# Altium footprint library Miscellaneous Devices.PcbLib: 306 footprints (part 2 of 20)
Each footprint in its own frame and in the unit in brackets; x right, y up, seen from the top. Pads: shape width x height; smd on the part's side, far side on the other; paste and mask are expansions set on the pad; w line width, h text height; cw(c..) or ccw(c..) is an arc to the next point about the centre after c.
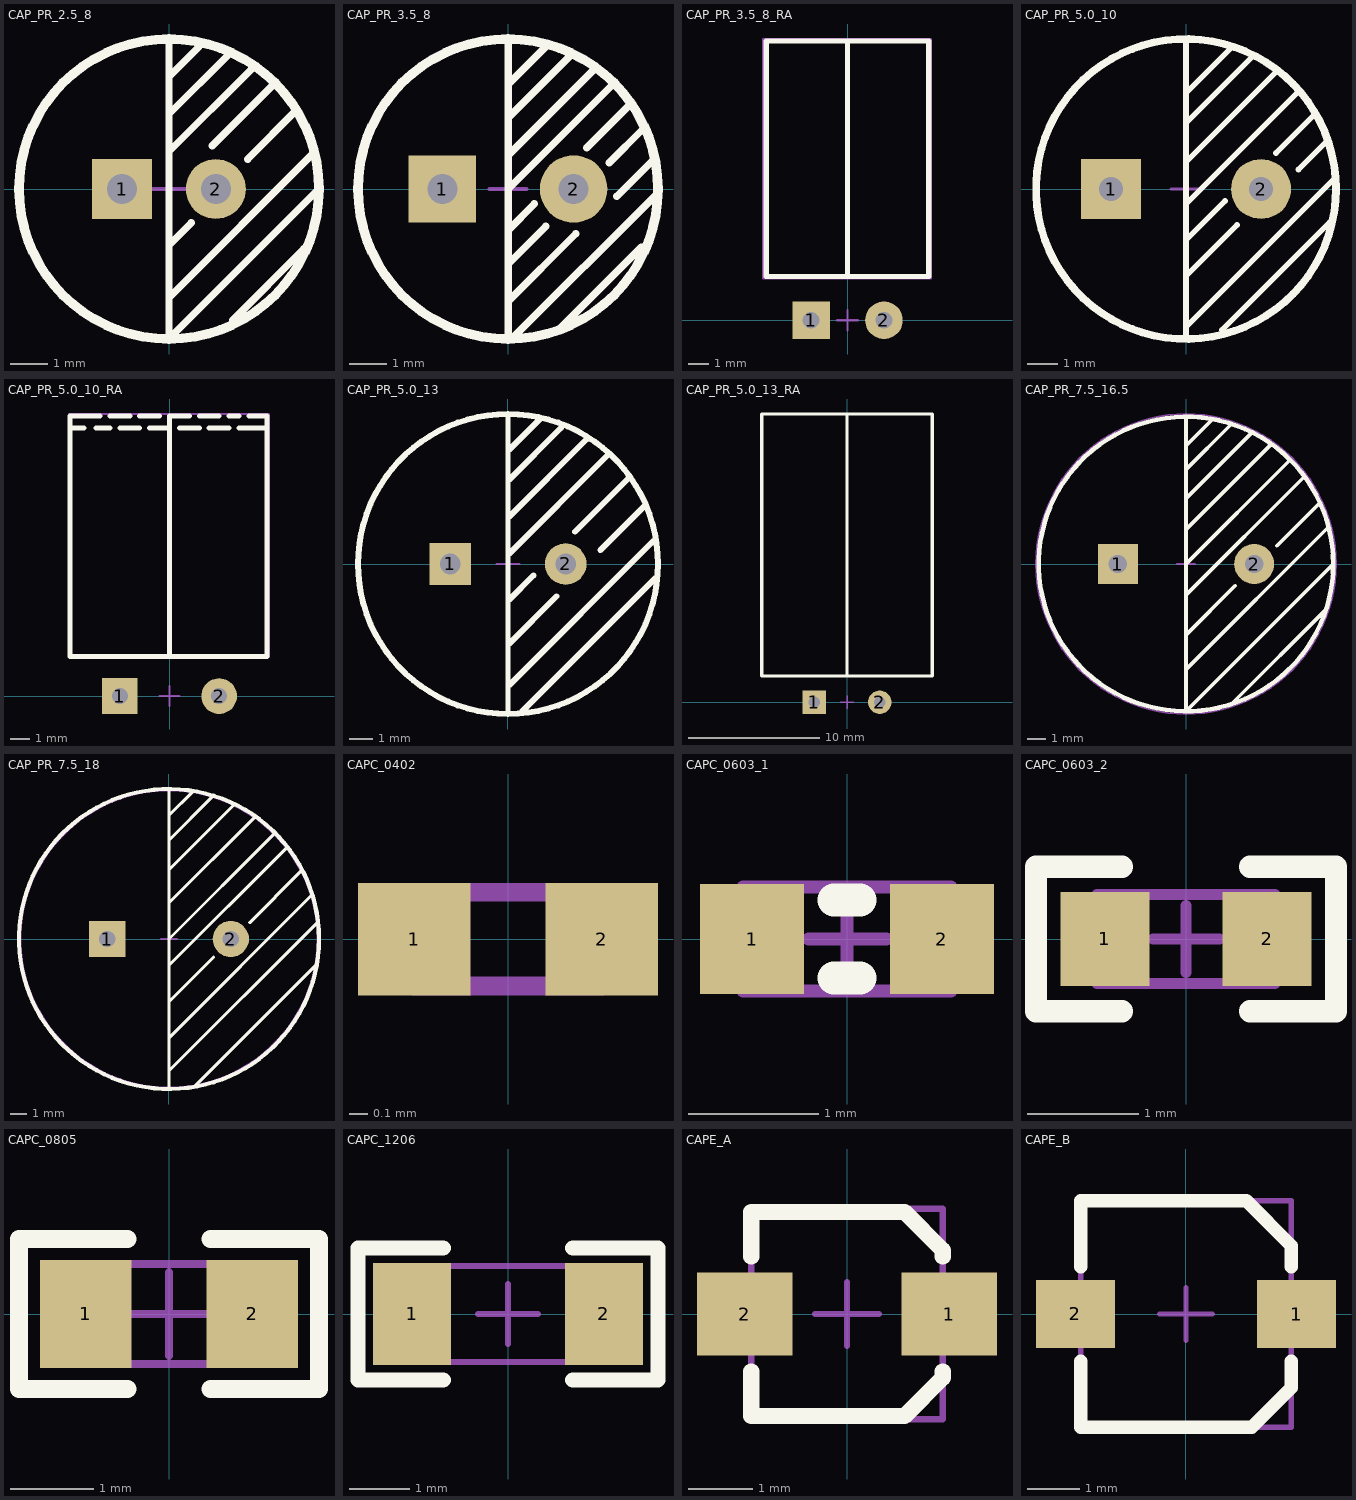
[diagram p1: the footprints below, top view; thin cyan lines are the x and y axes]

## CAP_PR_2.5_8 [mm] "8X12"
pads (2):
  rect 1.6x1.6 hole 0.8: 1(-1.25,0)
  round 1.6 hole 0.8: 2(1.25,0)
Top Overlay:
  circle w0.254: c0,0 r4.001
  lines w0.2: 0,-2.9 3.85,0.95 ; 0,-1.5 0.6,-0.9 ; 0,1 2.2,3.2 ; 0,3 0.8,3.8 ; 0,4 0,-4 4,0 ; 1.15,1.15 2.8,2.8 ; 1.6,3.6 0,2 ; 2.1,0.8 3.4,2.1 ; 3.6,-1.6 1.7,-3.5 ; 0,2 0,2 ; 1.7,-3.5 1.7,-3.5
Mechanical 15:
  circle w0.1: c0,0 r4
  lines w0.1: -0.5,0 0.5,0 ; 0,-0.5 0,0.5
3D body: height 12.3, standoff -5.5, extent -4.078,-4.056 4.05,4.056

## CAP_PR_3.5_8 [mm] "8X12"
pads (2):
  rect 1.8x1.8 hole 0.8: 1(-1.75,0)
  round 1.8 hole 0.8: 2(1.75,0)
Top Overlay:
  circle w0.254: c-0.001,0 r4.001
  lines w0.2: 0,-4 0,4 ; 0,-2 1,-1 ; 0,0 2.8,2.8 ; 0,0.9 2.3,3.2 ; 0,2.8 1,3.8 ; 0.1,-4 3.95,-0.15 ; 0.7,-0.4 0,-1.1 ; 1.4,-3.7 3.55,-1.55 ; 1.7,3.6 0,1.9 ; 1.8,-1.2 0,-3 ; 2.1,1.1 3.3,2.3 ; 2.7,0.7 3.6,1.6 ; 2.9,-0.2 3.9,0.8 ; 0,-3 0,-3 ; 0,-1.1 0,-1.1 ; 0,1.9 0,1.9 ; 3.6,1.6 3.6,1.6
Mechanical 15:
  circle w0.1: c0,0 r4
  lines w0.1: -0.5,0 0.5,0 ; 0,-0.5 0,0.5
3D body: height 11.8, standoff -5.5, extent -4.078,-4.056 4.05,4.056

## CAP_PR_3.5_8_RA [mm] "8X12"
pads (2):
  rect 1.8x1.8 hole 0.8: 1(-1.75,0)
  round 1.8 hole 0.8: 2(1.75,0)
Top Overlay:
  lines w0.254: 0,2.1 0,13.4 ; -3.9,2.1 -3.9,13.4 3.9,13.4 3.9,2.1 -3.9,2.1
Mechanical 15:
  lines w0.1: -0.5,0 0.5,0 ; 0,-0.5 0,0.5 ; -4.051,2 4,2 4,13.5 -4.051,13.5 -4.051,2
3D body: height 8.03, standoff -2, extent -4.051,-0.31 4,13.51

## CAP_PR_5.0_10 [mm] "10X12.5"
pads (2):
  rect 2x2 hole 0.8: 1(-2.5,0)
  round 2 hole 0.8: 2(2.5,0)
Top Overlay:
  circle w0.254: c-0.001,0 r5
  lines w0.2: 0,-4.9 0,5 ; 0,-4.6 5,0.4 ; 0,-2.9 1.7,-1.2 ; 0,-0.5 3.7,3.2 ; 0,2.2 2.2,4.4 ; 1.2,-4.7 4.8,-1.1 ; 1.3,-0.4 0,-1.7 ; 1.5,4.7 0,3.2 ; 3,1.2 4.3,2.5 ; 3,3.9 0,0.9 ; 3.75,0.65 4.7,1.6 ; 0,-1.7 0,-1.7 ; 0,0.9 0,0.9 ; 0,3.2 0,3.2 ; 4.3,2.5 4.3,2.5
Mechanical 15:
  circle w0.1: c0,0 r5
  lines w0.1: -0.5,0 0.5,0 ; 0,-0.5 0,0.5
3D body: height 12.8, standoff -5.5, extent -5.06,-5.058 5.1,5.1

## CAP_PR_5.0_10_RA [mm] "10X12.5"
pads (2):
  rect 1.8x1.8 hole 0.8: 1(-2.5,0)
  round 1.8 hole 0.8: 2(2.5,0)
Top Overlay:
  lines w0.254: -5,13.5 -4.3,13.5 ; -3.7,13.5 -3,13.5 ; -3.5,14.1 -5,14.1 -5,2 4.9,2 4.9,14.1 4,14.1 ; -3,14.1 -2,14.1 ; -2.5,13.5 -1.5,13.5 ; -1.5,14.1 -0.5,14.1 ; -1,13.5 0,13.5 ; 0,2 0,14.1 1,14.1 ; 0.5,13.5 1.5,13.5 ; 1.5,14.1 2.5,14.1 ; 2,13.5 3,13.5 ; 3,14.1 3.5,14.1 ; 3.5,13.5 4.9,13.5
Mechanical 15:
  lines w0.1: -0.5,0 0.5,0 ; 0,-0.5 0,0.5 ; -5.051,2 5,2 5,14.2 -5.051,14.2 -5.051,2
3D body: height 10.03, standoff -3.68, extent -5.051,-0.294 5,14.194

## CAP_PR_5.0_13 [mm] "13X21"
pads (2):
  rect 1.8x1.8 hole 0.9: 1(-2.5,0)
  round 1.8 hole 0.9: 2(2.5,0)
Top Overlay:
  circle w0.254: c0,0 r6.5
  lines w0.2: 0,-6.5 0,6.5
  lines w0.254: 0.05,-5.25 6.3,1 ; 0.05,-3.45 2.1,-1.4 ; 0.05,-1.55 1.1,-0.5 ; 0.05,0.45 4.3,4.7 ; 0.05,2.05 3.4,5.4 ; 0.05,3.65 2.3,5.9 ; 0.05,4.95 1.4,6.3 ; 0.6,-6.4 6.4,-0.6 ; 2.9,1.4 5.2,3.7 ; 4,0.6 5.9,2.5 ; 4.3,4.7 4.3,4.7 ; 6.4,-0.6 6.4,-0.6
Mechanical 15:
  circle w0.1: c0,0 r6.5
  lines w0.1: -0.5,0 0.5,0 ; 0,-0.5 0,0.5
3D body: height 21.3, standoff -1.2, extent -6.5,-6.49 6.495,6.49

## CAP_PR_5.0_13_RA [mm] "13X20"
pads (2):
  rect 1.8x1.8 hole 0.9: 1(-2.5,0)
  round 1.8 hole 0.9: 2(2.5,0)
Top Overlay:
  lines w0.254: 0,2 0,22 ; -6.5,2 6.5,2 6.5,22 -6.5,22 -6.5,2
Mechanical 15:
  lines w0.1: -0.5,0 0.5,0 ; 0,-0.5 0,0.5 ; -6.5,2 -6.5,22 6.5,22 6.5,2 -6.5,2
3D body: height 13.13, standoff -2.08, extent -6.525,-0.3 6.525,21.689

## CAP_PR_7.5_16.5 [mm] "16.5X25"
pads (2):
  rect 2.2x2.2 hole 1: 1(-3.75,0)
  round 2.2 hole 1: 2(3.75,0)
Top Overlay:
  circle w0.254: c0,0 r8.103
  lines w0.2: 0,-5.8 7.8,2 ; 0,-3.9 2.7,-1.2 ; 0,-1.7 6.5,4.8 ; 0,0 5.7,5.7 ; 0,3.6 3.6,7.2 ; 0,5.2 2.4,7.6 ; 0,6.5 1.4,7.9 ; 0,8.1 0,-8.1 8.1,0 ; 2.6,-7.6 7.7,-2.5 ; 4.7,6.6 0,1.9 ; 5,1 7.3,3.3 ; 0,1.9 0,1.9
Mechanical 15:
  circle w0.1: c0,0 r8.25
  lines w0.1: -0.5,0 0.5,0 ; 0,-0.5 0,0.5
3D body: height 26.2, standoff -2.7, extent -8.25,-8.23 8.233,8.23

## CAP_PR_7.5_18 [mm] "18X40"
pads (2):
  rect 2.2x2.2 hole 1: 1(-3.75,0)
  round 2.2 hole 1: 2(3.75,0)
Top Overlay:
  circle w0.254: c0,0 r9.101
  lines w0.2: 0,-9.1 0,9.1 ; 0,-3.8 2.7,-1.1 ; 0,-1.6 7.15,5.55 ; 0,0 6.4,6.4 ; 0,2.2 5.2,7.4 ; 0,4.2 3.9,8.1 ; 0,6 2.6,8.6 ; 0,7.5 1.4,8.9 ; 0.05,-5.95 8.7,2.7 ; 4.9,1 8,4.1 ; 8.9,-1.6 1.5,-9 ; 9,1 0,-8 ; 0,-8 0,-8 ; 1.5,-9 1.5,-9
Mechanical 15:
  circle w0.1: c0,0 r9
  lines w0.1: -0.5,0 0.5,0 ; 0,-0.5 0,0.5
3D body: height 41.56, standoff -2.58, extent -9.14,-9.08 9.14,9.2

## CAPC_0402 [mm]
pads (2):
  rect 0.6x0.6 smd mask+0.051: 1(-0.5,0) 2(0.5,0)
Mechanical 15:
  lines w0.1: -0.5,-0.25 -0.5,0.25 0.5,0.25 0.5,-0.25 -0.5,-0.25
3D body: height 0.5, standoff 0, extent -0.5,-0.25 0.5,0.25

## CAPC_0603_1 [mm]
pads (2):
  rect 0.8x0.85 smd: 1(-0.73,0) 2(0.73,0)
Top Overlay:
  lines w0.254: -0.1,-0.3 0.1,-0.3 ; -0.1,0.3 0.1,0.3
Mechanical 15:
  lines w0.1: -0.297,0 0.303,0 ; 0,-0.3 0,0.3 ; -0.8,-0.4 -0.8,0.4 0.8,0.4 0.8,-0.4 -0.8,-0.4
3D body: height 0.6, standoff 0, extent -0.8,-0.4 0.8,0.4

## CAPC_0603_2 [mm]
pads (2):
  rect 0.8x0.85 smd: 1(-0.73,0) 2(0.73,0)
Top Overlay:
  lines w0.2: -0.575,-0.65 -1.35,-0.65 -1.35,0.65 -0.575,0.65 ; 0.575,-0.65 1.35,-0.65 1.35,0.65 0.575,0.65
Mechanical 15:
  lines w0.1: -0.297,0 0.303,0 ; 0,-0.3 0,0.3 ; -0.8,-0.4 0.8,-0.4 0.8,0.4 -0.8,0.4 -0.8,-0.4
3D body: height 0.6, standoff 0, extent -0.8,-0.4 0.8,0.4

## CAPC_0805 [mm]
pads (2):
  rect 1.1x1.3 smd: 1(-1,0) 2(1,0)
Top Overlay:
  lines w0.22: -0.5,-0.9 -1.8,-0.9 -1.8,0.9 -0.5,0.9 ; 0.5,-0.9 1.8,-0.9 1.8,0.9 0.5,0.9
Mechanical 15:
  lines w0.1: -0.5,0 0.5,0 ; 0,-0.5 0,0.5 ; -1,-0.6 -1,0.6 1,0.6 1,-0.6 -1,-0.6
3D body: height 0.95, standoff 0, extent -1,-0.6 1,0.6

## CAPC_1206 [mm]
pads (2):
  rect 1.3x1.7 smd: 1(-1.6,0) 2(1.6,0)
Top Overlay:
  lines w0.254: -1.079,-1.1 -2.5,-1.1 -2.5,1.1 -1.079,1.1 ; 1.079,-1.1 2.5,-1.1 2.5,1.1 1.079,1.1
Mechanical 15:
  lines w0.1: -0.5,0 0.5,0 ; 0,-0.5 0,0.5 ; -1.6,-0.8 -1.6,0.8 1.6,0.8 1.6,-0.8 -1.6,-0.8
3D body: height 0.95, standoff 0, extent -1.6,-0.8 1.6,0.8

## CAPE_A [mm] "3X3.3X5.4"
pads (2):
  rect 1.5x1.3 smd: 1(1.6,0) 2(-1.6,0)
Top Overlay:
  lines w0.254: -1.5,-0.9 -1.5,-1.6 0.9,-1.6 1.5,-1 1.5,-0.9 ; -1.5,0.9 -1.5,1.6 0.9,1.6 1.5,1 1.5,0.9
Mechanical 15:
  lines w0.1: -0.5,0 0.5,0 ; 0,-0.5 0,0.5 ; -1.5,-1.65 -1.5,1.65 1.5,1.65 1.5,-1.65 -1.5,-1.65
3D body: height 5.4, standoff 0, extent -1.8,-1.65 1.8,1.65

## CAPE_B [mm] "4X4.3X5.4"
pads (2):
  rect 1.5x1.3 smd: 1(2.1,0) 2(-2.1,0)
Top Overlay:
  lines w0.254: -2,-0.9 -2,-2.15 1.25,-2.15 2,-1.4 2,-0.9 ; -2,0.9 -2,2.15 1.15,2.15 2,1.3 2,0.9
Mechanical 15:
  lines w0.1: -0.5,0 0.5,0 ; 0,-0.5 0,0.5 ; 2,-2.15 -2,-2.15 -2,2.15 2,2.15 2,-2.115
3D body: height 5.4, standoff 0, extent -2.3,-2.175 2.3,2.125